# Altium footprint library SOP510P1015X375-4N.PcbLib: 1 footprints
Each footprint in its own frame and in the unit in brackets; x right, y up, seen from the top. Pads: shape width x height; smd on the part's side, far side on the other; paste and mask are expansions set on the pad; w line width, h text height; cw(c..) or ccw(c..) is an arc to the next point about the centre after c.
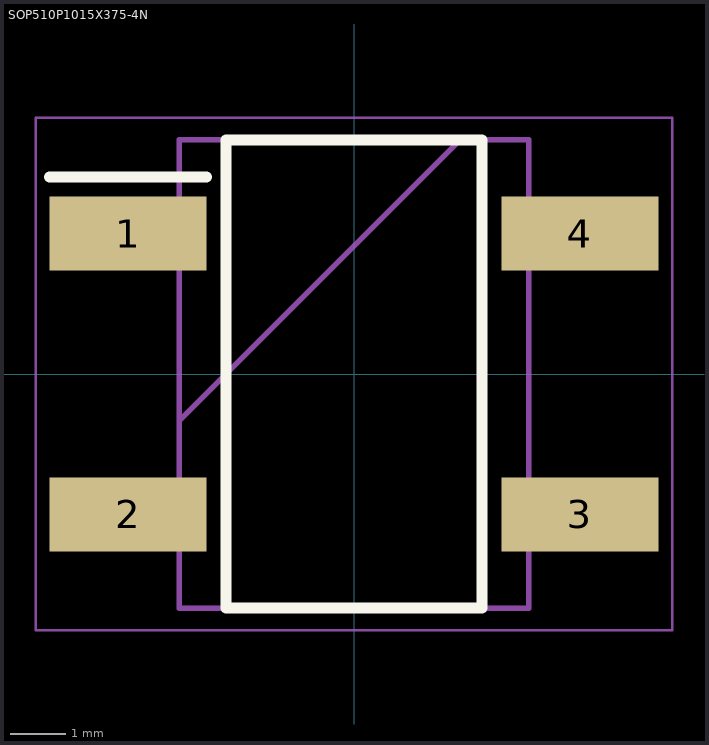
[diagram p0: the footprint, top view; thin cyan lines are the x and y axes]

## SOP510P1015X375-4N [mm]
pads (4):
  rect 2.85x1.35 smd: 1(-4.1,2.55) 2(-4.1,-2.55) 3(4.1,-2.55) 4(4.1,2.55)
Top Overlay:
  lines w0.2: -5.525,3.575 -2.675,3.575 ; -2.325,-4.25 2.325,-4.25 2.325,4.25 -2.325,4.25 -2.325,-4.25
Mechanical 15:
  lines w0.1: -3.175,-0.85 1.925,4.25 ; -3.175,-4.25 3.175,-4.25 3.175,4.25 -3.175,4.25 -3.175,-4.25
Mechanical 20:
  lines w0.05: -5.775,-4.65 5.775,-4.65 5.775,4.65 -5.775,4.65 -5.775,-4.65